# Altium footprint library FootPrintLib_7.PcbLib: 358 footprints (part 3 of 24)
Each footprint in its own frame and in the unit in brackets; x right, y up, seen from the top. Pads: shape width x height; smd on the part's side, far side on the other; paste and mask are expansions set on the pad; w line width, h text height; cw(c..) or ccw(c..) is an arc to the next point about the centre after c.
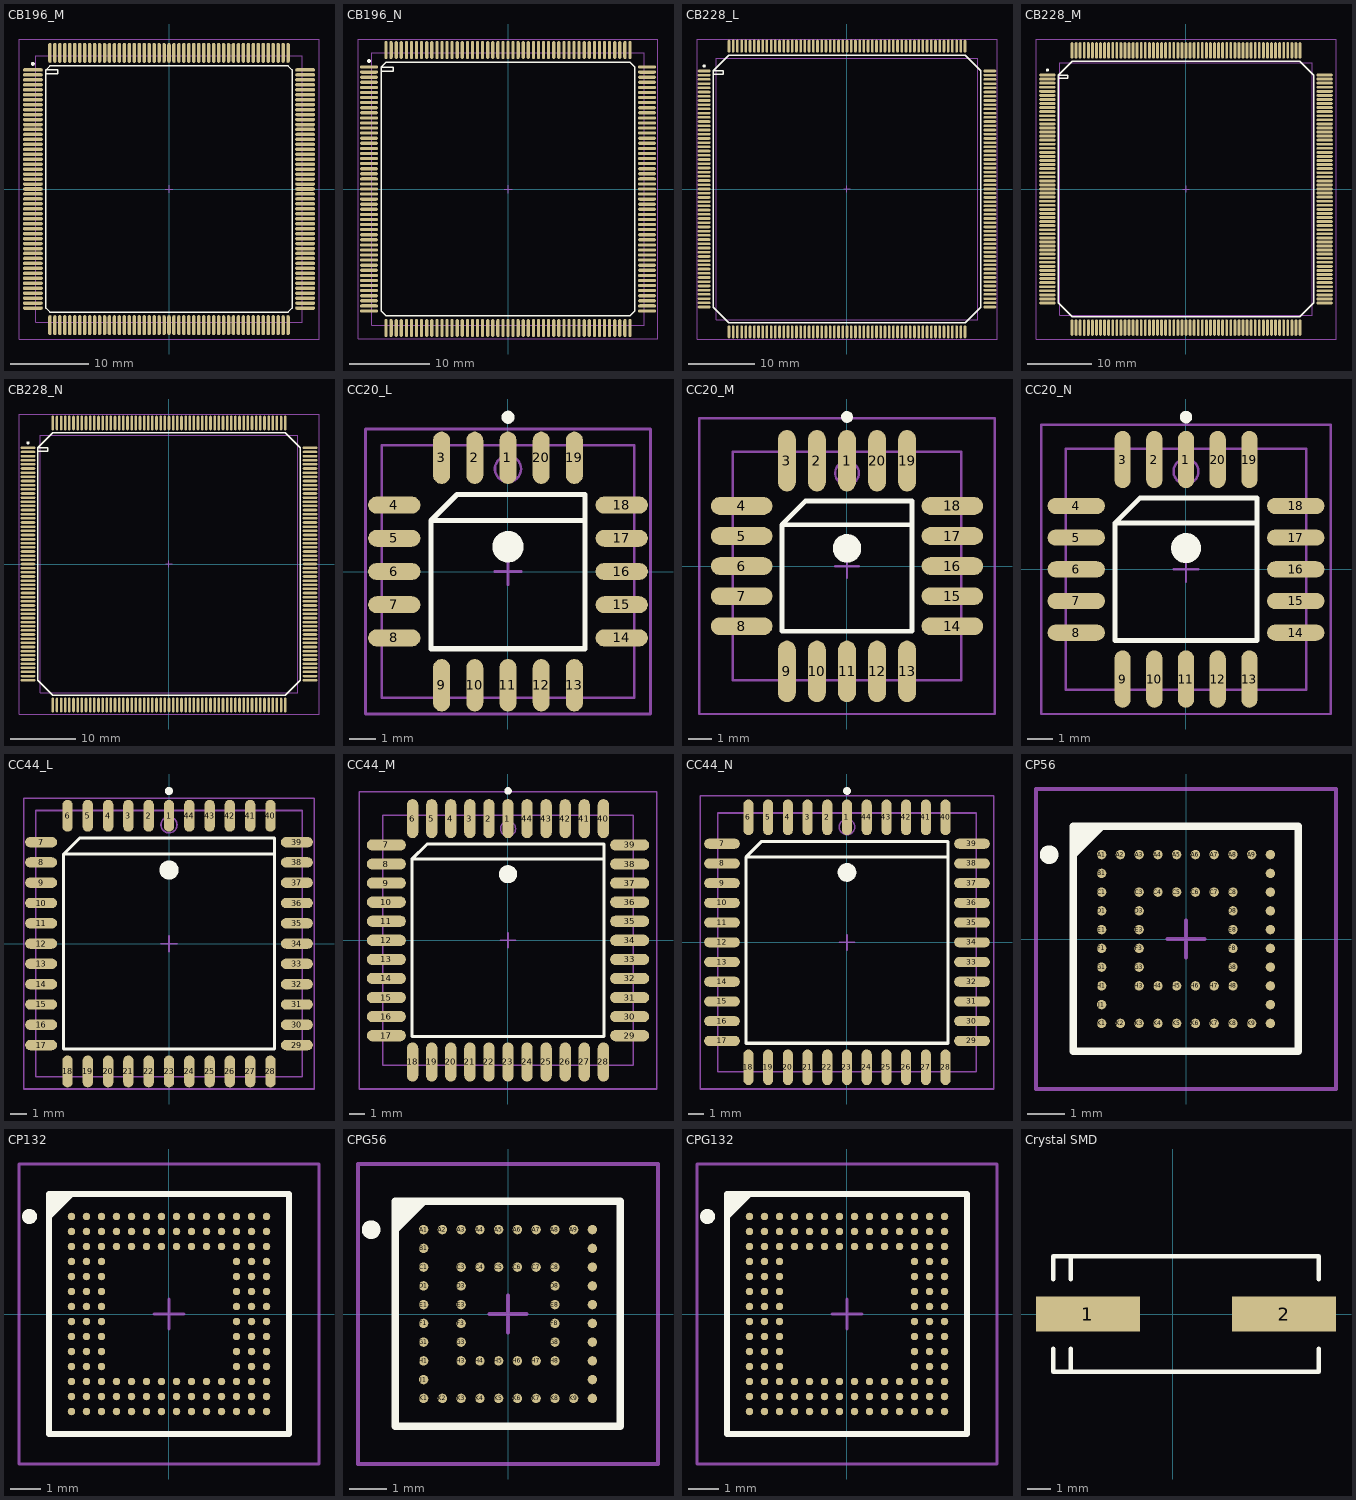
[diagram p2: the footprints below, top view; thin cyan lines are the x and y axes]

## CB196_M [mm] "196-Pin Ceramic Brazed Quad Flat Pack (CB196), IPC Low Density"
height 3.4
pads (196):
  oval 2.55x0.45 smd: 1(-17.425,15.24) 2(-17.425,14.605) 3(-17.425,13.97) 4(-17.425,13.335) 5(-17.425,12.7) 6(-17.425,12.065) 7(-17.425,11.43) 8(-17.425,10.795) 9(-17.425,10.16) 10(-17.425,9.525) 11(-17.425,8.89) 12(-17.425,8.255) 13(-17.425,7.62) 14(-17.425,6.985) 15(-17.425,6.35) 16(-17.425,5.715) 17(-17.425,5.08) 18(-17.425,4.445) 19(-17.425,3.81) 20(-17.425,3.175) 21(-17.425,2.54) 22(-17.425,1.905) 23(-17.425,1.27) 24(-17.425,0.635) 25(-17.425,0) 26(-17.425,-0.635) 27(-17.425,-1.27) 28(-17.425,-1.905) 29(-17.425,-2.54) 30(-17.425,-3.175) 31(-17.425,-3.81) 32(-17.425,-4.445) 33(-17.425,-5.08) 34(-17.425,-5.715) 35(-17.425,-6.35) 36(-17.425,-6.985) 37(-17.425,-7.62) 38(-17.425,-8.255) 39(-17.425,-8.89) 40(-17.425,-9.525) 41(-17.425,-10.16) 42(-17.425,-10.795) 43(-17.425,-11.43) 44(-17.425,-12.065) 45(-17.425,-12.7) 46(-17.425,-13.335) 47(-17.425,-13.97) 48(-17.425,-14.605) 49(-17.425,-15.24) 99(17.425,-15.24) 100(17.425,-14.605) 101(17.425,-13.97) 102(17.425,-13.335) 103(17.425,-12.7) 104(17.425,-12.065) 105(17.425,-11.43) 106(17.425,-10.795) 107(17.425,-10.16) 108(17.425,-9.525) 109(17.425,-8.89) 110(17.425,-8.255) 111(17.425,-7.62) 112(17.425,-6.985) 113(17.425,-6.35) 114(17.425,-5.715) 115(17.425,-5.08) 116(17.425,-4.445) 117(17.425,-3.81) 118(17.425,-3.175) 119(17.425,-2.54) 120(17.425,-1.905) 121(17.425,-1.27) 122(17.425,-0.635) 123(17.425,0) 124(17.425,0.635) 125(17.425,1.27) 126(17.425,1.905) 127(17.425,2.54) 128(17.425,3.175) 129(17.425,3.81) 130(17.425,4.445) 131(17.425,5.08) 132(17.425,5.715) 133(17.425,6.35) 134(17.425,6.985) 135(17.425,7.62) 136(17.425,8.255) 137(17.425,8.89) 138(17.425,9.525) 139(17.425,10.16) 140(17.425,10.795) 141(17.425,11.43) 142(17.425,12.065) 143(17.425,12.7) 144(17.425,13.335) 145(17.425,13.97) 146(17.425,14.605) 147(17.425,15.24)
  oval 0.45x2.55 smd: 50(-15.24,-17.425) 51(-14.605,-17.425) 52(-13.97,-17.425) 53(-13.335,-17.425) 54(-12.7,-17.425) 55(-12.065,-17.425) 56(-11.43,-17.425) 57(-10.795,-17.425) 58(-10.16,-17.425) 59(-9.525,-17.425) 60(-8.89,-17.425) 61(-8.255,-17.425) 62(-7.62,-17.425) 63(-6.985,-17.425) 64(-6.35,-17.425) 65(-5.715,-17.425) 66(-5.08,-17.425) 67(-4.445,-17.425) 68(-3.81,-17.425) 69(-3.175,-17.425) 70(-2.54,-17.425) 71(-1.905,-17.425) 72(-1.27,-17.425) 73(-0.635,-17.425) 74(0,-17.425) 75(0.635,-17.425) 76(1.27,-17.425) 77(1.905,-17.425) 78(2.54,-17.425) 79(3.175,-17.425) 80(3.81,-17.425) 81(4.445,-17.425) 82(5.08,-17.425) 83(5.715,-17.425) 84(6.35,-17.425) 85(6.985,-17.425) 86(7.62,-17.425) 87(8.255,-17.425) 88(8.89,-17.425) 89(9.525,-17.425) 90(10.16,-17.425) 91(10.795,-17.425) 92(11.43,-17.425) 93(12.065,-17.425) 94(12.7,-17.425) 95(13.335,-17.425) 96(13.97,-17.425) 97(14.605,-17.425) 98(15.24,-17.425) 148(15.24,17.425) 149(14.605,17.425) 150(13.97,17.425) 151(13.335,17.425) 152(12.7,17.425) 153(12.065,17.425) 154(11.43,17.425) 155(10.795,17.425) 156(10.16,17.425) 157(9.525,17.425) 158(8.89,17.425) 159(8.255,17.425) 160(7.62,17.425) 161(6.985,17.425) 162(6.35,17.425) 163(5.715,17.425) 164(5.08,17.425) 165(4.445,17.425) 166(3.81,17.425) 167(3.175,17.425) 168(2.54,17.425) 169(1.905,17.425) 170(1.27,17.425) 171(0.635,17.425) 172(0,17.425) 173(-0.635,17.425) 174(-1.27,17.425) 175(-1.905,17.425) 176(-2.54,17.425) 177(-3.175,17.425) 178(-3.81,17.425) 179(-4.445,17.425) 180(-5.08,17.425) 181(-5.715,17.425) 182(-6.35,17.425) 183(-6.985,17.425) 184(-7.62,17.425) 185(-8.255,17.425) 186(-8.89,17.425) 187(-9.525,17.425) 188(-10.16,17.425) 189(-10.795,17.425) 190(-11.43,17.425) 191(-12.065,17.425) 192(-12.7,17.425) 193(-13.335,17.425) 194(-13.97,17.425) 195(-14.605,17.425) 196(-15.24,17.425)
Top Overlay:
  circle w0.25: c-17.425,16.015 r0.125
  lines w0.2: -15.75,14.74 -14.25,14.74 -14.25,15.24 -15.75,15.24 ; -15.75,15.24 -15.24,15.75 15.24,15.75 15.75,15.24 15.75,-15.24 15.24,-15.75 -15.24,-15.75 -15.75,-15.24 -15.75,15.24
Mechanical 13:
  lines w0.1: -17.025,-17.025 17.025,-17.025 17.025,17.025 -17.025,17.025 -17.025,-17.025
Mechanical 15:
  lines w0.1: -0.5,0 0.5,0 ; 0,-0.5 0,0.5 ; -19.2,-19.2 19.2,-19.2 19.2,19.2 -19.2,19.2 -19.2,-19.2
3D body: height 3.4, standoff 0, extent -17.025,-17.025 17.025,17.025

## CB196_N [mm] "196-Pin Ceramic Brazed Quad Flat Pack (CB196), IPC Medium Density"
height 3.4
pads (196):
  oval 2.25x0.4 smd: 1(-17.375,15.24) 2(-17.375,14.605) 3(-17.375,13.97) 4(-17.375,13.335) 5(-17.375,12.7) 6(-17.375,12.065) 7(-17.375,11.43) 8(-17.375,10.795) 9(-17.375,10.16) 10(-17.375,9.525) 11(-17.375,8.89) 12(-17.375,8.255) 13(-17.375,7.62) 14(-17.375,6.985) 15(-17.375,6.35) 16(-17.375,5.715) 17(-17.375,5.08) 18(-17.375,4.445) 19(-17.375,3.81) 20(-17.375,3.175) 21(-17.375,2.54) 22(-17.375,1.905) 23(-17.375,1.27) 24(-17.375,0.635) 25(-17.375,0) 26(-17.375,-0.635) 27(-17.375,-1.27) 28(-17.375,-1.905) 29(-17.375,-2.54) 30(-17.375,-3.175) 31(-17.375,-3.81) 32(-17.375,-4.445) 33(-17.375,-5.08) 34(-17.375,-5.715) 35(-17.375,-6.35) 36(-17.375,-6.985) 37(-17.375,-7.62) 38(-17.375,-8.255) 39(-17.375,-8.89) 40(-17.375,-9.525) 41(-17.375,-10.16) 42(-17.375,-10.795) 43(-17.375,-11.43) 44(-17.375,-12.065) 45(-17.375,-12.7) 46(-17.375,-13.335) 47(-17.375,-13.97) 48(-17.375,-14.605) 49(-17.375,-15.24) 99(17.375,-15.24) 100(17.375,-14.605) 101(17.375,-13.97) 102(17.375,-13.335) 103(17.375,-12.7) 104(17.375,-12.065) 105(17.375,-11.43) 106(17.375,-10.795) 107(17.375,-10.16) 108(17.375,-9.525) 109(17.375,-8.89) 110(17.375,-8.255) 111(17.375,-7.62) 112(17.375,-6.985) 113(17.375,-6.35) 114(17.375,-5.715) 115(17.375,-5.08) 116(17.375,-4.445) 117(17.375,-3.81) 118(17.375,-3.175) 119(17.375,-2.54) 120(17.375,-1.905) 121(17.375,-1.27) 122(17.375,-0.635) 123(17.375,0) 124(17.375,0.635) 125(17.375,1.27) 126(17.375,1.905) 127(17.375,2.54) 128(17.375,3.175) 129(17.375,3.81) 130(17.375,4.445) 131(17.375,5.08) 132(17.375,5.715) 133(17.375,6.35) 134(17.375,6.985) 135(17.375,7.62) 136(17.375,8.255) 137(17.375,8.89) 138(17.375,9.525) 139(17.375,10.16) 140(17.375,10.795) 141(17.375,11.43) 142(17.375,12.065) 143(17.375,12.7) 144(17.375,13.335) 145(17.375,13.97) 146(17.375,14.605) 147(17.375,15.24)
  oval 0.4x2.25 smd: 50(-15.24,-17.375) 51(-14.605,-17.375) 52(-13.97,-17.375) 53(-13.335,-17.375) 54(-12.7,-17.375) 55(-12.065,-17.375) 56(-11.43,-17.375) 57(-10.795,-17.375) 58(-10.16,-17.375) 59(-9.525,-17.375) 60(-8.89,-17.375) 61(-8.255,-17.375) 62(-7.62,-17.375) 63(-6.985,-17.375) 64(-6.35,-17.375) 65(-5.715,-17.375) 66(-5.08,-17.375) 67(-4.445,-17.375) 68(-3.81,-17.375) 69(-3.175,-17.375) 70(-2.54,-17.375) 71(-1.905,-17.375) 72(-1.27,-17.375) 73(-0.635,-17.375) 74(0,-17.375) 75(0.635,-17.375) 76(1.27,-17.375) 77(1.905,-17.375) 78(2.54,-17.375) 79(3.175,-17.375) 80(3.81,-17.375) 81(4.445,-17.375) 82(5.08,-17.375) 83(5.715,-17.375) 84(6.35,-17.375) 85(6.985,-17.375) 86(7.62,-17.375) 87(8.255,-17.375) 88(8.89,-17.375) 89(9.525,-17.375) 90(10.16,-17.375) 91(10.795,-17.375) 92(11.43,-17.375) 93(12.065,-17.375) 94(12.7,-17.375) 95(13.335,-17.375) 96(13.97,-17.375) 97(14.605,-17.375) 98(15.24,-17.375) 148(15.24,17.375) 149(14.605,17.375) 150(13.97,17.375) 151(13.335,17.375) 152(12.7,17.375) 153(12.065,17.375) 154(11.43,17.375) 155(10.795,17.375) 156(10.16,17.375) 157(9.525,17.375) 158(8.89,17.375) 159(8.255,17.375) 160(7.62,17.375) 161(6.985,17.375) 162(6.35,17.375) 163(5.715,17.375) 164(5.08,17.375) 165(4.445,17.375) 166(3.81,17.375) 167(3.175,17.375) 168(2.54,17.375) 169(1.905,17.375) 170(1.27,17.375) 171(0.635,17.375) 172(0,17.375) 173(-0.635,17.375) 174(-1.27,17.375) 175(-1.905,17.375) 176(-2.54,17.375) 177(-3.175,17.375) 178(-3.81,17.375) 179(-4.445,17.375) 180(-5.08,17.375) 181(-5.715,17.375) 182(-6.35,17.375) 183(-6.985,17.375) 184(-7.62,17.375) 185(-8.255,17.375) 186(-8.89,17.375) 187(-9.525,17.375) 188(-10.16,17.375) 189(-10.795,17.375) 190(-11.43,17.375) 191(-12.065,17.375) 192(-12.7,17.375) 193(-13.335,17.375) 194(-13.97,17.375) 195(-14.605,17.375) 196(-15.24,17.375)
Top Overlay:
  circle w0.25: c-17.375,15.99 r0.125
  lines w0.2: -15.85,14.74 -14.35,14.74 -14.35,15.24 -15.85,15.24 ; -15.85,15.24 -15.24,15.85 15.24,15.85 15.85,15.24 15.85,-15.24 15.24,-15.85 -15.24,-15.85 -15.85,-15.24 -15.85,15.24
Mechanical 13:
  lines w0.1: -17.025,-17.025 17.025,-17.025 17.025,17.025 -17.025,17.025 -17.025,-17.025
Mechanical 15:
  lines w0.1: -0.5,0 0.5,0 ; 0,-0.5 0,0.5 ; -18.75,-18.75 18.75,-18.75 18.75,18.75 -18.75,18.75 -18.75,-18.75
3D body: height 3.4, standoff 0, extent -17.025,-17.025 17.025,17.025

## CB228_L [mm] "228-Pin Ceramic Brazed Quad Flat Pack (CB228), IPC High Density"
height 3.4
pads (228):
  oval 1.95x0.4 smd: 1(-21.525,17.78) 2(-21.525,17.145) 3(-21.525,16.51) 4(-21.525,15.875) 5(-21.525,15.24) 6(-21.525,14.605) 7(-21.525,13.97) 8(-21.525,13.335) 9(-21.525,12.7) 10(-21.525,12.065) 11(-21.525,11.43) 12(-21.525,10.795) 13(-21.525,10.16) 14(-21.525,9.525) 15(-21.525,8.89) 16(-21.525,8.255) 17(-21.525,7.62) 18(-21.525,6.985) 19(-21.525,6.35) 20(-21.525,5.715) 21(-21.525,5.08) 22(-21.525,4.445) 23(-21.525,3.81) 24(-21.525,3.175) 25(-21.525,2.54) 26(-21.525,1.905) 27(-21.525,1.27) 28(-21.525,0.635) 29(-21.525,0) 30(-21.525,-0.635) 31(-21.525,-1.27) 32(-21.525,-1.905) 33(-21.525,-2.54) 34(-21.525,-3.175) 35(-21.525,-3.81) 36(-21.525,-4.445) 37(-21.525,-5.08) 38(-21.525,-5.715) 39(-21.525,-6.35) 40(-21.525,-6.985) 41(-21.525,-7.62) 42(-21.525,-8.255) 43(-21.525,-8.89) 44(-21.525,-9.525) 45(-21.525,-10.16) 46(-21.525,-10.795) 47(-21.525,-11.43) 48(-21.525,-12.065) 49(-21.525,-12.7) 50(-21.525,-13.335) 51(-21.525,-13.97) 52(-21.525,-14.605) 53(-21.525,-15.24) 54(-21.525,-15.875) 55(-21.525,-16.51) 56(-21.525,-17.145) 57(-21.525,-17.78) 115(21.525,-17.78) 116(21.525,-17.145) 117(21.525,-16.51) 118(21.525,-15.875) 119(21.525,-15.24) 120(21.525,-14.605) 121(21.525,-13.97) 122(21.525,-13.335) 123(21.525,-12.7) 124(21.525,-12.065) 125(21.525,-11.43) 126(21.525,-10.795) 127(21.525,-10.16) 128(21.525,-9.525) 129(21.525,-8.89) 130(21.525,-8.255) 131(21.525,-7.62) 132(21.525,-6.985) 133(21.525,-6.35) 134(21.525,-5.715) 135(21.525,-5.08) 136(21.525,-4.445) 137(21.525,-3.81) 138(21.525,-3.175) 139(21.525,-2.54) 140(21.525,-1.905) 141(21.525,-1.27) 142(21.525,-0.635) 143(21.525,0) 144(21.525,0.635) 145(21.525,1.27) 146(21.525,1.905) 147(21.525,2.54) 148(21.525,3.175) 149(21.525,3.81) 150(21.525,4.445) 151(21.525,5.08) 152(21.525,5.715) 153(21.525,6.35) 154(21.525,6.985) 155(21.525,7.62) 156(21.525,8.255) 157(21.525,8.89) 158(21.525,9.525) 159(21.525,10.16) 160(21.525,10.795) 161(21.525,11.43) 162(21.525,12.065) 163(21.525,12.7) 164(21.525,13.335) 165(21.525,13.97) 166(21.525,14.605) 167(21.525,15.24) 168(21.525,15.875) 169(21.525,16.51) 170(21.525,17.145) 171(21.525,17.78)
  oval 0.4x1.95 smd: 58(-17.78,-21.525) 59(-17.145,-21.525) 60(-16.51,-21.525) 61(-15.875,-21.525) 62(-15.24,-21.525) 63(-14.605,-21.525) 64(-13.97,-21.525) 65(-13.335,-21.525) 66(-12.7,-21.525) 67(-12.065,-21.525) 68(-11.43,-21.525) 69(-10.795,-21.525) 70(-10.16,-21.525) 71(-9.525,-21.525) 72(-8.89,-21.525) 73(-8.255,-21.525) 74(-7.62,-21.525) 75(-6.985,-21.525) 76(-6.35,-21.525) 77(-5.715,-21.525) 78(-5.08,-21.525) 79(-4.445,-21.525) 80(-3.81,-21.525) 81(-3.175,-21.525) 82(-2.54,-21.525) 83(-1.905,-21.525) 84(-1.27,-21.525) 85(-0.635,-21.525) 86(0,-21.525) 87(0.635,-21.525) 88(1.27,-21.525) 89(1.905,-21.525) 90(2.54,-21.525) 91(3.175,-21.525) 92(3.81,-21.525) 93(4.445,-21.525) 94(5.08,-21.525) 95(5.715,-21.525) 96(6.35,-21.525) 97(6.985,-21.525) 98(7.62,-21.525) 99(8.255,-21.525) 100(8.89,-21.525) 101(9.525,-21.525) 102(10.16,-21.525) 103(10.795,-21.525) 104(11.43,-21.525) 105(12.065,-21.525) 106(12.7,-21.525) 107(13.335,-21.525) 108(13.97,-21.525) 109(14.605,-21.525) 110(15.24,-21.525) 111(15.875,-21.525) 112(16.51,-21.525) 113(17.145,-21.525) 114(17.78,-21.525) 172(17.78,21.525) 173(17.145,21.525) 174(16.51,21.525) 175(15.875,21.525) 176(15.24,21.525) 177(14.605,21.525) 178(13.97,21.525) 179(13.335,21.525) 180(12.7,21.525) 181(12.065,21.525) 182(11.43,21.525) 183(10.795,21.525) 184(10.16,21.525) 185(9.525,21.525) 186(8.89,21.525) 187(8.255,21.525) 188(7.62,21.525) 189(6.985,21.525) 190(6.35,21.525) 191(5.715,21.525) 192(5.08,21.525) 193(4.445,21.525) 194(3.81,21.525) 195(3.175,21.525) 196(2.54,21.525) 197(1.905,21.525) 198(1.27,21.525) 199(0.635,21.525) 200(0,21.525) 201(-0.635,21.525) 202(-1.27,21.525) 203(-1.905,21.525) 204(-2.54,21.525) 205(-3.175,21.525) 206(-3.81,21.525) 207(-4.445,21.525) 208(-5.08,21.525) 209(-5.715,21.525) 210(-6.35,21.525) 211(-6.985,21.525) 212(-7.62,21.525) 213(-8.255,21.525) 214(-8.89,21.525) 215(-9.525,21.525) 216(-10.16,21.525) 217(-10.795,21.525) 218(-11.43,21.525) 219(-12.065,21.525) 220(-12.7,21.525) 221(-13.335,21.525) 222(-13.97,21.525) 223(-14.605,21.525) 224(-15.24,21.525) 225(-15.875,21.525) 226(-16.51,21.525) 227(-17.145,21.525) 228(-17.78,21.525)
Top Overlay:
  circle w0.25: c-21.525,18.53 r0.125
  lines w0.2: -20.15,17.28 -18.65,17.28 -18.65,17.78 -20.15,17.78 ; -20.15,17.78 -20.15,-17.78 -17.78,-20.15 17.78,-20.15 20.15,-17.78 20.15,17.78 17.78,20.15 -17.78,20.15 -20.15,17.78
Mechanical 13:
  lines w0.1: -19.71,-19.71 -19.71,19.71 19.71,19.71 19.71,-19.71 -19.71,-19.71
Mechanical 15:
  lines w0.1: -0.5,0 0.5,0 ; 0,-0.5 0,0.5 ; -22.6,-22.6 -22.6,22.6 22.6,22.6 22.6,-22.6 -22.6,-22.6
3D body: height 3.4, standoff 0, extent -19.71,-19.71 19.71,19.71

## CB228_M [mm] "228-Pin Ceramic Brazed Quad Flat Pack (CB228), IPC Low Density"
height 3.4
pads (228):
  oval 2.55x0.45 smd: 1(-21.625,17.78) 2(-21.625,17.145) 3(-21.625,16.51) 4(-21.625,15.875) 5(-21.625,15.24) 6(-21.625,14.605) 7(-21.625,13.97) 8(-21.625,13.335) 9(-21.625,12.7) 10(-21.625,12.065) 11(-21.625,11.43) 12(-21.625,10.795) 13(-21.625,10.16) 14(-21.625,9.525) 15(-21.625,8.89) 16(-21.625,8.255) 17(-21.625,7.62) 18(-21.625,6.985) 19(-21.625,6.35) 20(-21.625,5.715) 21(-21.625,5.08) 22(-21.625,4.445) 23(-21.625,3.81) 24(-21.625,3.175) 25(-21.625,2.54) 26(-21.625,1.905) 27(-21.625,1.27) 28(-21.625,0.635) 29(-21.625,0) 30(-21.625,-0.635) 31(-21.625,-1.27) 32(-21.625,-1.905) 33(-21.625,-2.54) 34(-21.625,-3.175) 35(-21.625,-3.81) 36(-21.625,-4.445) 37(-21.625,-5.08) 38(-21.625,-5.715) 39(-21.625,-6.35) 40(-21.625,-6.985) 41(-21.625,-7.62) 42(-21.625,-8.255) 43(-21.625,-8.89) 44(-21.625,-9.525) 45(-21.625,-10.16) 46(-21.625,-10.795) 47(-21.625,-11.43) 48(-21.625,-12.065) 49(-21.625,-12.7) 50(-21.625,-13.335) 51(-21.625,-13.97) 52(-21.625,-14.605) 53(-21.625,-15.24) 54(-21.625,-15.875) 55(-21.625,-16.51) 56(-21.625,-17.145) 57(-21.625,-17.78) 115(21.625,-17.78) 116(21.625,-17.145) 117(21.625,-16.51) 118(21.625,-15.875) 119(21.625,-15.24) 120(21.625,-14.605) 121(21.625,-13.97) 122(21.625,-13.335) 123(21.625,-12.7) 124(21.625,-12.065) 125(21.625,-11.43) 126(21.625,-10.795) 127(21.625,-10.16) 128(21.625,-9.525) 129(21.625,-8.89) 130(21.625,-8.255) 131(21.625,-7.62) 132(21.625,-6.985) 133(21.625,-6.35) 134(21.625,-5.715) 135(21.625,-5.08) 136(21.625,-4.445) 137(21.625,-3.81) 138(21.625,-3.175) 139(21.625,-2.54) 140(21.625,-1.905) 141(21.625,-1.27) 142(21.625,-0.635) 143(21.625,0) 144(21.625,0.635) 145(21.625,1.27) 146(21.625,1.905) 147(21.625,2.54) 148(21.625,3.175) 149(21.625,3.81) 150(21.625,4.445) 151(21.625,5.08) 152(21.625,5.715) 153(21.625,6.35) 154(21.625,6.985) 155(21.625,7.62) 156(21.625,8.255) 157(21.625,8.89) 158(21.625,9.525) 159(21.625,10.16) 160(21.625,10.795) 161(21.625,11.43) 162(21.625,12.065) 163(21.625,12.7) 164(21.625,13.335) 165(21.625,13.97) 166(21.625,14.605) 167(21.625,15.24) 168(21.625,15.875) 169(21.625,16.51) 170(21.625,17.145) 171(21.625,17.78)
  oval 0.45x2.55 smd: 58(-17.78,-21.625) 59(-17.145,-21.625) 60(-16.51,-21.625) 61(-15.875,-21.625) 62(-15.24,-21.625) 63(-14.605,-21.625) 64(-13.97,-21.625) 65(-13.335,-21.625) 66(-12.7,-21.625) 67(-12.065,-21.625) 68(-11.43,-21.625) 69(-10.795,-21.625) 70(-10.16,-21.625) 71(-9.525,-21.625) 72(-8.89,-21.625) 73(-8.255,-21.625) 74(-7.62,-21.625) 75(-6.985,-21.625) 76(-6.35,-21.625) 77(-5.715,-21.625) 78(-5.08,-21.625) 79(-4.445,-21.625) 80(-3.81,-21.625) 81(-3.175,-21.625) 82(-2.54,-21.625) 83(-1.905,-21.625) 84(-1.27,-21.625) 85(-0.635,-21.625) 86(0,-21.625) 87(0.635,-21.625) 88(1.27,-21.625) 89(1.905,-21.625) 90(2.54,-21.625) 91(3.175,-21.625) 92(3.81,-21.625) 93(4.445,-21.625) 94(5.08,-21.625) 95(5.715,-21.625) 96(6.35,-21.625) 97(6.985,-21.625) 98(7.62,-21.625) 99(8.255,-21.625) 100(8.89,-21.625) 101(9.525,-21.625) 102(10.16,-21.625) 103(10.795,-21.625) 104(11.43,-21.625) 105(12.065,-21.625) 106(12.7,-21.625) 107(13.335,-21.625) 108(13.97,-21.625) 109(14.605,-21.625) 110(15.24,-21.625) 111(15.875,-21.625) 112(16.51,-21.625) 113(17.145,-21.625) 114(17.78,-21.625) 172(17.78,21.625) 173(17.145,21.625) 174(16.51,21.625) 175(15.875,21.625) 176(15.24,21.625) 177(14.605,21.625) 178(13.97,21.625) 179(13.335,21.625) 180(12.7,21.625) 181(12.065,21.625) 182(11.43,21.625) 183(10.795,21.625) 184(10.16,21.625) 185(9.525,21.625) 186(8.89,21.625) 187(8.255,21.625) 188(7.62,21.625) 189(6.985,21.625) 190(6.35,21.625) 191(5.715,21.625) 192(5.08,21.625) 193(4.445,21.625) 194(3.81,21.625) 195(3.175,21.625) 196(2.54,21.625) 197(1.905,21.625) 198(1.27,21.625) 199(0.635,21.625) 200(0,21.625) 201(-0.635,21.625) 202(-1.27,21.625) 203(-1.905,21.625) 204(-2.54,21.625) 205(-3.175,21.625) 206(-3.81,21.625) 207(-4.445,21.625) 208(-5.08,21.625) 209(-5.715,21.625) 210(-6.35,21.625) 211(-6.985,21.625) 212(-7.62,21.625) 213(-8.255,21.625) 214(-8.89,21.625) 215(-9.525,21.625) 216(-10.16,21.625) 217(-10.795,21.625) 218(-11.43,21.625) 219(-12.065,21.625) 220(-12.7,21.625) 221(-13.335,21.625) 222(-13.97,21.625) 223(-14.605,21.625) 224(-15.24,21.625) 225(-15.875,21.625) 226(-16.51,21.625) 227(-17.145,21.625) 228(-17.78,21.625)
Top Overlay:
  circle w0.25: c-21.625,18.555 r0.125
  lines w0.2: -19.95,17.28 -18.45,17.28 -18.45,17.78 -19.95,17.78 ; -19.95,17.78 -19.95,-17.78 -17.78,-19.95 17.78,-19.95 19.95,-17.78 19.95,17.78 17.78,19.95 -17.78,19.95 -19.95,17.78
Mechanical 13:
  lines w0.1: -19.71,-19.71 -19.71,19.71 19.71,19.71 19.71,-19.71 -19.71,-19.71
Mechanical 15:
  lines w0.1: -0.5,0 0.5,0 ; 0,-0.5 0,0.5 ; -23.4,-23.4 -23.4,23.4 23.4,23.4 23.4,-23.4 -23.4,-23.4
3D body: height 3.4, standoff 0, extent -19.71,-19.71 19.71,19.71

## CB228_N [mm] "228-Pin Ceramic Brazed Quad Flat Pack (CB228), IPC Medium Density"
height 3.4
pads (228):
  oval 2.25x0.4 smd: 1(-21.575,17.78) 2(-21.575,17.145) 3(-21.575,16.51) 4(-21.575,15.875) 5(-21.575,15.24) 6(-21.575,14.605) 7(-21.575,13.97) 8(-21.575,13.335) 9(-21.575,12.7) 10(-21.575,12.065) 11(-21.575,11.43) 12(-21.575,10.795) 13(-21.575,10.16) 14(-21.575,9.525) 15(-21.575,8.89) 16(-21.575,8.255) 17(-21.575,7.62) 18(-21.575,6.985) 19(-21.575,6.35) 20(-21.575,5.715) 21(-21.575,5.08) 22(-21.575,4.445) 23(-21.575,3.81) 24(-21.575,3.175) 25(-21.575,2.54) 26(-21.575,1.905) 27(-21.575,1.27) 28(-21.575,0.635) 29(-21.575,0) 30(-21.575,-0.635) 31(-21.575,-1.27) 32(-21.575,-1.905) 33(-21.575,-2.54) 34(-21.575,-3.175) 35(-21.575,-3.81) 36(-21.575,-4.445) 37(-21.575,-5.08) 38(-21.575,-5.715) 39(-21.575,-6.35) 40(-21.575,-6.985) 41(-21.575,-7.62) 42(-21.575,-8.255) 43(-21.575,-8.89) 44(-21.575,-9.525) 45(-21.575,-10.16) 46(-21.575,-10.795) 47(-21.575,-11.43) 48(-21.575,-12.065) 49(-21.575,-12.7) 50(-21.575,-13.335) 51(-21.575,-13.97) 52(-21.575,-14.605) 53(-21.575,-15.24) 54(-21.575,-15.875) 55(-21.575,-16.51) 56(-21.575,-17.145) 57(-21.575,-17.78) 115(21.575,-17.78) 116(21.575,-17.145) 117(21.575,-16.51) 118(21.575,-15.875) 119(21.575,-15.24) 120(21.575,-14.605) 121(21.575,-13.97) 122(21.575,-13.335) 123(21.575,-12.7) 124(21.575,-12.065) 125(21.575,-11.43) 126(21.575,-10.795) 127(21.575,-10.16) 128(21.575,-9.525) 129(21.575,-8.89) 130(21.575,-8.255) 131(21.575,-7.62) 132(21.575,-6.985) 133(21.575,-6.35) 134(21.575,-5.715) 135(21.575,-5.08) 136(21.575,-4.445) 137(21.575,-3.81) 138(21.575,-3.175) 139(21.575,-2.54) 140(21.575,-1.905) 141(21.575,-1.27) 142(21.575,-0.635) 143(21.575,0) 144(21.575,0.635) 145(21.575,1.27) 146(21.575,1.905) 147(21.575,2.54) 148(21.575,3.175) 149(21.575,3.81) 150(21.575,4.445) 151(21.575,5.08) 152(21.575,5.715) 153(21.575,6.35) 154(21.575,6.985) 155(21.575,7.62) 156(21.575,8.255) 157(21.575,8.89) 158(21.575,9.525) 159(21.575,10.16) 160(21.575,10.795) 161(21.575,11.43) 162(21.575,12.065) 163(21.575,12.7) 164(21.575,13.335) 165(21.575,13.97) 166(21.575,14.605) 167(21.575,15.24) 168(21.575,15.875) 169(21.575,16.51) 170(21.575,17.145) 171(21.575,17.78)
  oval 0.4x2.25 smd: 58(-17.78,-21.575) 59(-17.145,-21.575) 60(-16.51,-21.575) 61(-15.875,-21.575) 62(-15.24,-21.575) 63(-14.605,-21.575) 64(-13.97,-21.575) 65(-13.335,-21.575) 66(-12.7,-21.575) 67(-12.065,-21.575) 68(-11.43,-21.575) 69(-10.795,-21.575) 70(-10.16,-21.575) 71(-9.525,-21.575) 72(-8.89,-21.575) 73(-8.255,-21.575) 74(-7.62,-21.575) 75(-6.985,-21.575) 76(-6.35,-21.575) 77(-5.715,-21.575) 78(-5.08,-21.575) 79(-4.445,-21.575) 80(-3.81,-21.575) 81(-3.175,-21.575) 82(-2.54,-21.575) 83(-1.905,-21.575) 84(-1.27,-21.575) 85(-0.635,-21.575) 86(0,-21.575) 87(0.635,-21.575) 88(1.27,-21.575) 89(1.905,-21.575) 90(2.54,-21.575) 91(3.175,-21.575) 92(3.81,-21.575) 93(4.445,-21.575) 94(5.08,-21.575) 95(5.715,-21.575) 96(6.35,-21.575) 97(6.985,-21.575) 98(7.62,-21.575) 99(8.255,-21.575) 100(8.89,-21.575) 101(9.525,-21.575) 102(10.16,-21.575) 103(10.795,-21.575) 104(11.43,-21.575) 105(12.065,-21.575) 106(12.7,-21.575) 107(13.335,-21.575) 108(13.97,-21.575) 109(14.605,-21.575) 110(15.24,-21.575) 111(15.875,-21.575) 112(16.51,-21.575) 113(17.145,-21.575) 114(17.78,-21.575) 172(17.78,21.575) 173(17.145,21.575) 174(16.51,21.575) 175(15.875,21.575) 176(15.24,21.575) 177(14.605,21.575) 178(13.97,21.575) 179(13.335,21.575) 180(12.7,21.575) 181(12.065,21.575) 182(11.43,21.575) 183(10.795,21.575) 184(10.16,21.575) 185(9.525,21.575) 186(8.89,21.575) 187(8.255,21.575) 188(7.62,21.575) 189(6.985,21.575) 190(6.35,21.575) 191(5.715,21.575) 192(5.08,21.575) 193(4.445,21.575) 194(3.81,21.575) 195(3.175,21.575) 196(2.54,21.575) 197(1.905,21.575) 198(1.27,21.575) 199(0.635,21.575) 200(0,21.575) 201(-0.635,21.575) 202(-1.27,21.575) 203(-1.905,21.575) 204(-2.54,21.575) 205(-3.175,21.575) 206(-3.81,21.575) 207(-4.445,21.575) 208(-5.08,21.575) 209(-5.715,21.575) 210(-6.35,21.575) 211(-6.985,21.575) 212(-7.62,21.575) 213(-8.255,21.575) 214(-8.89,21.575) 215(-9.525,21.575) 216(-10.16,21.575) 217(-10.795,21.575) 218(-11.43,21.575) 219(-12.065,21.575) 220(-12.7,21.575) 221(-13.335,21.575) 222(-13.97,21.575) 223(-14.605,21.575) 224(-15.24,21.575) 225(-15.875,21.575) 226(-16.51,21.575) 227(-17.145,21.575) 228(-17.78,21.575)
Top Overlay:
  circle w0.25: c-21.575,18.53 r0.125
  lines w0.2: -20.05,17.28 -18.55,17.28 -18.55,17.78 -20.05,17.78 ; -20.05,17.78 -20.05,-17.78 -17.78,-20.05 17.78,-20.05 20.05,-17.78 20.05,17.78 17.78,20.05 -17.78,20.05 -20.05,17.78
Mechanical 13:
  lines w0.1: -19.71,-19.71 -19.71,19.71 19.71,19.71 19.71,-19.71 -19.71,-19.71
Mechanical 15:
  lines w0.1: -0.5,0 0.5,0 ; 0,-0.5 0,0.5 ; -22.95,-22.95 -22.95,22.95 22.95,22.95 22.95,-22.95 -22.95,-22.95
3D body: height 3.4, standoff 0, extent -19.71,-19.71 19.71,19.71

## CC20_L [mm] "20-Pin Ceramic Leaded Chip Carrier (CC20), IPC High Density"
height 3.94
pads (20):
  oval 0.65x2 smd: 1(0,4.35) 2(-1.27,4.35) 3(-2.54,4.35) 9(-2.54,-4.35) 10(-1.27,-4.35) 11(0,-4.35) 12(1.27,-4.35) 13(2.54,-4.35) 19(2.54,4.35) 20(1.27,4.35)
  oval 2x0.65 smd: 4(-4.35,2.54) 5(-4.35,1.27) 6(-4.35,0) 7(-4.35,-1.27) 8(-4.35,-2.54) 14(4.35,-2.54) 15(4.35,-1.27) 16(4.35,0) 17(4.35,1.27) 18(4.35,2.54)
Top Overlay:
  circle w0.25: c0,5.9 r0.125
  circle w0.6: c0,0.95 r0.3
  lines w0.2: 2.95,1.95 -2.95,1.95 ; -2.95,1.95 -1.95,2.95 2.95,2.95 2.95,-2.95 -2.95,-2.95 -2.95,1.95
Mechanical 13:
  circle w0.1: c0,3.925 r0.5
  lines w0.1: -4.825,-4.825 -4.825,4.825 4.825,4.825 4.825,-4.825 -4.825,-4.825
Mechanical 15:
  lines w0.1: -0.5,0 0.5,0 ; 0,-0.5 0,0.5 ; -5.45,-5.45 -5.45,5.45 5.45,5.45 5.45,-5.45 -5.45,-5.45
3D body: height 3.94, standoff 0, extent -4.825,-4.825 4.825,4.825

## CC20_M [mm] "20-Pin Ceramic Leaded Chip Carrier (CC20), IPC Low Density"
height 3.94
pads (20):
  oval 0.75x2.6 smd: 1(0,4.45) 2(-1.27,4.45) 3(-2.54,4.45) 9(-2.54,-4.45) 10(-1.27,-4.45) 11(0,-4.45) 12(1.27,-4.45) 13(2.54,-4.45) 19(2.54,4.45) 20(1.27,4.45)
  oval 2.6x0.75 smd: 4(-4.45,2.54) 5(-4.45,1.27) 6(-4.45,0) 7(-4.45,-1.27) 8(-4.45,-2.54) 14(4.45,-2.54) 15(4.45,-1.27) 16(4.45,0) 17(4.45,1.27) 18(4.45,2.54)
Top Overlay:
  circle w0.25: c0,6.3 r0.125
  circle w0.6: c0,0.75 r0.3
  lines w0.2: 2.75,1.75 -2.75,1.75 ; -2.75,1.75 -1.75,2.75 2.75,2.75 2.75,-2.75 -2.75,-2.75 -2.75,1.75
Mechanical 13:
  circle w0.1: c0,3.925 r0.5
  lines w0.1: -4.825,-4.825 -4.825,4.825 4.825,4.825 4.825,-4.825 -4.825,-4.825
Mechanical 15:
  lines w0.1: -0.5,0 0.5,0 ; 0,-0.5 0,0.5 ; -6.25,-6.25 -6.25,6.25 6.25,6.25 6.25,-6.25 -6.25,-6.25
3D body: height 3.94, standoff 0, extent -4.825,-4.825 4.825,4.825

## CC20_N [mm] "20-Pin Ceramic Leaded Chip Carrier (CC20), IPC Medium Density"
height 3.94
pads (20):
  oval 0.65x2.3 smd: 1(0,4.4) 2(-1.27,4.4) 3(-2.54,4.4) 9(-2.54,-4.4) 10(-1.27,-4.4) 11(0,-4.4) 12(1.27,-4.4) 13(2.54,-4.4) 19(2.54,4.4) 20(1.27,4.4)
  oval 2.3x0.65 smd: 4(-4.4,2.54) 5(-4.4,1.27) 6(-4.4,0) 7(-4.4,-1.27) 8(-4.4,-2.54) 14(4.4,-2.54) 15(4.4,-1.27) 16(4.4,0) 17(4.4,1.27) 18(4.4,2.54)
Top Overlay:
  circle w0.25: c0,6.1 r0.125
  circle w0.6: c0,0.85 r0.3
  lines w0.2: 2.85,1.85 -2.85,1.85 ; -2.85,1.85 -1.85,2.85 2.85,2.85 2.85,-2.85 -2.85,-2.85 -2.85,1.85
Mechanical 13:
  circle w0.1: c0,3.925 r0.5
  lines w0.1: -4.825,-4.825 -4.825,4.825 4.825,4.825 4.825,-4.825 -4.825,-4.825
Mechanical 15:
  lines w0.1: -0.5,0 0.5,0 ; 0,-0.5 0,0.5 ; -5.8,-5.8 -5.8,5.8 5.8,5.8 5.8,-5.8 -5.8,-5.8
3D body: height 3.94, standoff 0, extent -4.825,-4.825 4.825,4.825

## CC44_L [mm] "44-Pin Ceramic Chip Carrier Package (CC44), IPC High Density"
height 4.83
pads (44):
  oval 0.65x2 smd: 1(0,8) 2(-1.27,8) 3(-2.54,8) 4(-3.81,8) 5(-5.08,8) 6(-6.35,8) 18(-6.35,-8) 19(-5.08,-8) 20(-3.81,-8) 21(-2.54,-8) 22(-1.27,-8) 23(0,-8) 24(1.27,-8) 25(2.54,-8) 26(3.81,-8) 27(5.08,-8) 28(6.35,-8) 40(6.35,8) 41(5.08,8) 42(3.81,8) 43(2.54,8) 44(1.27,8)
  oval 2x0.65 smd: 7(-8,6.35) 8(-8,5.08) 9(-8,3.81) 10(-8,2.54) 11(-8,1.27) 12(-8,0) 13(-8,-1.27) 14(-8,-2.54) 15(-8,-3.81) 16(-8,-5.08) 17(-8,-6.35) 29(8,-6.35) 30(8,-5.08) 31(8,-3.81) 32(8,-2.54) 33(8,-1.27) 34(8,0) 35(8,1.27) 36(8,2.54) 37(8,3.81) 38(8,5.08) 39(8,6.35)
Top Overlay:
  circle w0.6: c0,4.6 r0.3
  circle w0.25: c0,9.55 r0.125
  lines w0.2: 6.6,5.6 -6.6,5.6 ; -6.6,5.6 -6.6,-6.6 6.6,-6.6 6.6,6.6 -5.6,6.6 -6.6,5.6
Mechanical 13:
  circle w0.1: c0,7.43 r0.5
  lines w0.1: -8.33,-8.33 8.33,-8.33 8.33,8.33 -8.33,8.33 -8.33,-8.33
Mechanical 15:
  lines w0.1: -0.5,0 0.5,0 ; 0,-0.5 0,0.5 ; -9.1,-9.1 9.1,-9.1 9.1,9.1 -9.1,9.1 -9.1,-9.1
3D body: height 4.83, standoff 0, extent -8.33,-8.33 8.33,8.33

## CC44_M [mm] "44-Pin Ceramic Chip Carrier Package (CC44), IPC Low Density"
height 4.83
pads (44):
  oval 0.75x2.6 smd: 1(0,8.1) 2(-1.27,8.1) 3(-2.54,8.1) 4(-3.81,8.1) 5(-5.08,8.1) 6(-6.35,8.1) 18(-6.35,-8.1) 19(-5.08,-8.1) 20(-3.81,-8.1) 21(-2.54,-8.1) 22(-1.27,-8.1) 23(0,-8.1) 24(1.27,-8.1) 25(2.54,-8.1) 26(3.81,-8.1) 27(5.08,-8.1) 28(6.35,-8.1) 40(6.35,8.1) 41(5.08,8.1) 42(3.81,8.1) 43(2.54,8.1) 44(1.27,8.1)
  oval 2.6x0.75 smd: 7(-8.1,6.35) 8(-8.1,5.08) 9(-8.1,3.81) 10(-8.1,2.54) 11(-8.1,1.27) 12(-8.1,0) 13(-8.1,-1.27) 14(-8.1,-2.54) 15(-8.1,-3.81) 16(-8.1,-5.08) 17(-8.1,-6.35) 29(8.1,-6.35) 30(8.1,-5.08) 31(8.1,-3.81) 32(8.1,-2.54) 33(8.1,-1.27) 34(8.1,0) 35(8.1,1.27) 36(8.1,2.54) 37(8.1,3.81) 38(8.1,5.08) 39(8.1,6.35)
Top Overlay:
  circle w0.25: c0,9.95 r0.125
  circle w0.6: c0,4.4 r0.3
  lines w0.2: 6.4,5.4 -6.4,5.4 ; -6.4,5.4 -5.4,6.4 6.4,6.4 6.4,-6.4 -6.4,-6.4 -6.4,5.4
Mechanical 13:
  circle w0.1: c0,7.43 r0.5
  lines w0.1: -8.33,-8.33 -8.33,8.33 8.33,8.33 8.33,-8.33 -8.33,-8.33
Mechanical 15:
  lines w0.1: -0.5,0 0.5,0 ; 0,-0.5 0,0.5 ; -9.9,-9.9 -9.9,9.9 9.9,9.9 9.9,-9.9 -9.9,-9.9
3D body: height 4.83, standoff 0, extent -8.33,-8.33 8.33,8.33

## CC44_N [mm] "44-Pin Ceramic Chip Carrier Package (CC44), IPC Medium Density"
height 4.83
pads (44):
  oval 0.65x2.3 smd: 1(0,8.05) 2(-1.27,8.05) 3(-2.54,8.05) 4(-3.81,8.05) 5(-5.08,8.05) 6(-6.35,8.05) 18(-6.35,-8.05) 19(-5.08,-8.05) 20(-3.81,-8.05) 21(-2.54,-8.05) 22(-1.27,-8.05) 23(0,-8.05) 24(1.27,-8.05) 25(2.54,-8.05) 26(3.81,-8.05) 27(5.08,-8.05) 28(6.35,-8.05) 40(6.35,8.05) 41(5.08,8.05) 42(3.81,8.05) 43(2.54,8.05) 44(1.27,8.05)
  oval 2.3x0.65 smd: 7(-8.05,6.35) 8(-8.05,5.08) 9(-8.05,3.81) 10(-8.05,2.54) 11(-8.05,1.27) 12(-8.05,0) 13(-8.05,-1.27) 14(-8.05,-2.54) 15(-8.05,-3.81) 16(-8.05,-5.08) 17(-8.05,-6.35) 29(8.05,-6.35) 30(8.05,-5.08) 31(8.05,-3.81) 32(8.05,-2.54) 33(8.05,-1.27) 34(8.05,0) 35(8.05,1.27) 36(8.05,2.54) 37(8.05,3.81) 38(8.05,5.08) 39(8.05,6.35)
Top Overlay:
  circle w0.25: c0,9.75 r0.125
  circle w0.6: c0,4.5 r0.3
  lines w0.2: 6.5,5.5 -6.5,5.5 ; -6.5,5.5 -5.5,6.5 6.5,6.5 6.5,-6.5 -6.5,-6.5 -6.5,5.5
Mechanical 13:
  circle w0.1: c0,7.43 r0.5
  lines w0.1: -8.33,-8.33 -8.33,8.33 8.33,8.33 8.33,-8.33 -8.33,-8.33
Mechanical 15:
  lines w0.1: -0.5,0 0.5,0 ; 0,-0.5 0,0.5 ; -9.45,-9.45 -9.45,9.45 9.45,9.45 9.45,-9.45 -9.45,-9.45
3D body: height 4.83, standoff 0, extent -8.33,-8.33 8.33,8.33

## CP56 [mm] "56-Ball Chip Scale Ball Grid Array 0.5 mm Pitch (CP56)"
height 1.35
pads (56):
  round 0.25 smd: A1(-2.25,2.25) A2(-1.75,2.25) A3(-1.25,2.25) A4(-0.75,2.25) A5(-0.25,2.25) A6(0.25,2.25) A7(0.75,2.25) A8(1.25,2.25) A9(1.75,2.25) A10(2.25,2.25) B1(-2.25,1.75) B10(2.25,1.75) C1(-2.25,1.25) C3(-1.25,1.25) C4(-0.75,1.25) C5(-0.25,1.25) C6(0.25,1.25) C7(0.75,1.25) C8(1.25,1.25) C10(2.25,1.25) D1(-2.25,0.75) D3(-1.25,0.75) D8(1.25,0.75) D10(2.25,0.75) E1(-2.25,0.25) E3(-1.25,0.25) E8(1.25,0.25) E10(2.25,0.25) F1(-2.25,-0.25) F3(-1.25,-0.25) F8(1.25,-0.25) F10(2.25,-0.25) G1(-2.25,-0.75) G3(-1.25,-0.75) G8(1.25,-0.75) G10(2.25,-0.75) H1(-2.25,-1.25) H3(-1.25,-1.25) H4(-0.75,-1.25) H5(-0.25,-1.25) H6(0.25,-1.25) H7(0.75,-1.25) H8(1.25,-1.25) H10(2.25,-1.25) J1(-2.25,-1.75) J10(2.25,-1.75) K1(-2.25,-2.25) K2(-1.75,-2.25) K3(-1.25,-2.25) K4(-0.75,-2.25) K5(-0.25,-2.25) K6(0.25,-2.25) K7(0.75,-2.25) K8(1.25,-2.25) K9(1.75,-2.25) K10(2.25,-2.25)
Top Overlay:
  circle w0.25: c-3.65,2.25 r0.125
  region: -2.242,3 -3,2.242 -3,3
  lines w0.2: -3,2.242 -2.242,3 ; -3,-3 -3,3 3,3 3,-3 -3,-3
Mechanical 13:
  lines w0.1: -3,-3 -3,3 3,3 3,-3 -3,-3
Mechanical 15:
  lines w0.1: -0.5,0 0.5,0 ; 0,-0.5 0,0.5 ; -4,-4 -4,4 4,4 4,-4 -4,-4
3D body: height 1.35, standoff 0, extent -3,-3 3,3

## CP132 [mm] "132-Ball Chip Scale Ball Grid Array 0.5 mm Pitch (CP132)"
height 1.1
pads (132):
  round 0.25 smd: A1(-3.25,3.25) A2(-2.75,3.25) A3(-2.25,3.25) A4(-1.75,3.25) A5(-1.25,3.25) A6(-0.75,3.25) A7(-0.25,3.25) A8(0.25,3.25) A9(0.75,3.25) A10(1.25,3.25) A11(1.75,3.25) A12(2.25,3.25) A13(2.75,3.25) A14(3.25,3.25) B1(-3.25,2.75) B2(-2.75,2.75) B3(-2.25,2.75) B4(-1.75,2.75) B5(-1.25,2.75) B6(-0.75,2.75) B7(-0.25,2.75) B8(0.25,2.75) B9(0.75,2.75) B10(1.25,2.75) B11(1.75,2.75) B12(2.25,2.75) B13(2.75,2.75) B14(3.25,2.75) C1(-3.25,2.25) C2(-2.75,2.25) C3(-2.25,2.25) C4(-1.75,2.25) C5(-1.25,2.25) C6(-0.75,2.25) C7(-0.25,2.25) C8(0.25,2.25) C9(0.75,2.25) C10(1.25,2.25) C11(1.75,2.25) C12(2.25,2.25) C13(2.75,2.25) C14(3.25,2.25) D1(-3.25,1.75) D2(-2.75,1.75) D3(-2.25,1.75) D12(2.25,1.75) D13(2.75,1.75) D14(3.25,1.75) E1(-3.25,1.25) E2(-2.75,1.25) E3(-2.25,1.25) E12(2.25,1.25) E13(2.75,1.25) E14(3.25,1.25) F1(-3.25,0.75) F2(-2.75,0.75) F3(-2.25,0.75) F12(2.25,0.75) F13(2.75,0.75) F14(3.25,0.75) G1(-3.25,0.25) G2(-2.75,0.25) G3(-2.25,0.25) G12(2.25,0.25) G13(2.75,0.25) G14(3.25,0.25) H1(-3.25,-0.25) H2(-2.75,-0.25) H3(-2.25,-0.25) H12(2.25,-0.25) H13(2.75,-0.25) H14(3.25,-0.25) J1(-3.25,-0.75) J2(-2.75,-0.75) J3(-2.25,-0.75) J12(2.25,-0.75) J13(2.75,-0.75) J14(3.25,-0.75) K1(-3.25,-1.25) K2(-2.75,-1.25) K3(-2.25,-1.25) K12(2.25,-1.25) K13(2.75,-1.25) K14(3.25,-1.25) L1(-3.25,-1.75) L2(-2.75,-1.75) L3(-2.25,-1.75) L12(2.25,-1.75) L13(2.75,-1.75) L14(3.25,-1.75) M1(-3.25,-2.25) M2(-2.75,-2.25) M3(-2.25,-2.25) M4(-1.75,-2.25) M5(-1.25,-2.25) M6(-0.75,-2.25) M7(-0.25,-2.25) M8(0.25,-2.25) M9(0.75,-2.25) M10(1.25,-2.25) M11(1.75,-2.25) M12(2.25,-2.25) M13(2.75,-2.25) M14(3.25,-2.25) N1(-3.25,-2.75) N2(-2.75,-2.75) N3(-2.25,-2.75) N4(-1.75,-2.75) N5(-1.25,-2.75) N6(-0.75,-2.75) N7(-0.25,-2.75) N8(0.25,-2.75) N9(0.75,-2.75) N10(1.25,-2.75) N11(1.75,-2.75) N12(2.25,-2.75) N13(2.75,-2.75) N14(3.25,-2.75) P1(-3.25,-3.25) P2(-2.75,-3.25) P3(-2.25,-3.25) P4(-1.75,-3.25) P5(-1.25,-3.25) P6(-0.75,-3.25) P7(-0.25,-3.25) P8(0.25,-3.25) P9(0.75,-3.25) P10(1.25,-3.25) P11(1.75,-3.25) P12(2.25,-3.25) P13(2.75,-3.25) P14(3.25,-3.25)
Top Overlay:
  circle w0.25: c-4.65,3.25 r0.125
  region: -3.242,4 -4,3.242 -4,4
  lines w0.2: -4,3.242 -3.242,4 ; -4,-4 4,-4 4,4 -4,4 -4,-4
Mechanical 13:
  lines w0.1: -4,-4 4,-4 4,4 -4,4 -4,-4
Mechanical 15:
  lines w0.1: -0.5,0 0.5,0 ; 0,-0.5 0,0.5 ; -5,-5 5,-5 5,5 -5,5 -5,-5
3D body: height 1.1, standoff 0, extent -4,-4 4,4

## CPG56 [mm] "56-Ball Chip Scale Ball Grid Array 0.5 mm Pitch (CPG56) - Pb-Free"
height 1.35
pads (56):
  round 0.25 smd: A1(-2.25,2.25) A2(-1.75,2.25) A3(-1.25,2.25) A4(-0.75,2.25) A5(-0.25,2.25) A6(0.25,2.25) A7(0.75,2.25) A8(1.25,2.25) A9(1.75,2.25) A10(2.25,2.25) B1(-2.25,1.75) B10(2.25,1.75) C1(-2.25,1.25) C3(-1.25,1.25) C4(-0.75,1.25) C5(-0.25,1.25) C6(0.25,1.25) C7(0.75,1.25) C8(1.25,1.25) C10(2.25,1.25) D1(-2.25,0.75) D3(-1.25,0.75) D8(1.25,0.75) D10(2.25,0.75) E1(-2.25,0.25) E3(-1.25,0.25) E8(1.25,0.25) E10(2.25,0.25) F1(-2.25,-0.25) F3(-1.25,-0.25) F8(1.25,-0.25) F10(2.25,-0.25) G1(-2.25,-0.75) G3(-1.25,-0.75) G8(1.25,-0.75) G10(2.25,-0.75) H1(-2.25,-1.25) H3(-1.25,-1.25) H4(-0.75,-1.25) H5(-0.25,-1.25) H6(0.25,-1.25) H7(0.75,-1.25) H8(1.25,-1.25) H10(2.25,-1.25) J1(-2.25,-1.75) J10(2.25,-1.75) K1(-2.25,-2.25) K2(-1.75,-2.25) K3(-1.25,-2.25) K4(-0.75,-2.25) K5(-0.25,-2.25) K6(0.25,-2.25) K7(0.75,-2.25) K8(1.25,-2.25) K9(1.75,-2.25) K10(2.25,-2.25)
Top Overlay:
  circle w0.25: c-3.65,2.25 r0.125
  region: -2.242,3 -3,2.242 -3,3
  lines w0.2: -3,2.242 -2.242,3 ; -3,-3 3,-3 3,3 -3,3 -3,-3
Mechanical 13:
  lines w0.1: -3,-3 3,-3 3,3 -3,3 -3,-3
Mechanical 15:
  lines w0.1: -0.5,0 0.5,0 ; 0,-0.5 0,0.5 ; -4,-4 4,-4 4,4 -4,4 -4,-4
3D body: height 1.35, standoff 0, extent -3,-3 3,3

## CPG132 [mm] "132-Ball Chip Scale Ball Grid Array 0.5 mm Pitch (CPG132) - Pb-Free"
height 1.1
pads (132):
  round 0.25 smd: A1(-3.25,3.25) A2(-2.75,3.25) A3(-2.25,3.25) A4(-1.75,3.25) A5(-1.25,3.25) A6(-0.75,3.25) A7(-0.25,3.25) A8(0.25,3.25) A9(0.75,3.25) A10(1.25,3.25) A11(1.75,3.25) A12(2.25,3.25) A13(2.75,3.25) A14(3.25,3.25) B1(-3.25,2.75) B2(-2.75,2.75) B3(-2.25,2.75) B4(-1.75,2.75) B5(-1.25,2.75) B6(-0.75,2.75) B7(-0.25,2.75) B8(0.25,2.75) B9(0.75,2.75) B10(1.25,2.75) B11(1.75,2.75) B12(2.25,2.75) B13(2.75,2.75) B14(3.25,2.75) C1(-3.25,2.25) C2(-2.75,2.25) C3(-2.25,2.25) C4(-1.75,2.25) C5(-1.25,2.25) C6(-0.75,2.25) C7(-0.25,2.25) C8(0.25,2.25) C9(0.75,2.25) C10(1.25,2.25) C11(1.75,2.25) C12(2.25,2.25) C13(2.75,2.25) C14(3.25,2.25) D1(-3.25,1.75) D2(-2.75,1.75) D3(-2.25,1.75) D12(2.25,1.75) D13(2.75,1.75) D14(3.25,1.75) E1(-3.25,1.25) E2(-2.75,1.25) E3(-2.25,1.25) E12(2.25,1.25) E13(2.75,1.25) E14(3.25,1.25) F1(-3.25,0.75) F2(-2.75,0.75) F3(-2.25,0.75) F12(2.25,0.75) F13(2.75,0.75) F14(3.25,0.75) G1(-3.25,0.25) G2(-2.75,0.25) G3(-2.25,0.25) G12(2.25,0.25) G13(2.75,0.25) G14(3.25,0.25) H1(-3.25,-0.25) H2(-2.75,-0.25) H3(-2.25,-0.25) H12(2.25,-0.25) H13(2.75,-0.25) H14(3.25,-0.25) J1(-3.25,-0.75) J2(-2.75,-0.75) J3(-2.25,-0.75) J12(2.25,-0.75) J13(2.75,-0.75) J14(3.25,-0.75) K1(-3.25,-1.25) K2(-2.75,-1.25) K3(-2.25,-1.25) K12(2.25,-1.25) K13(2.75,-1.25) K14(3.25,-1.25) L1(-3.25,-1.75) L2(-2.75,-1.75) L3(-2.25,-1.75) L12(2.25,-1.75) L13(2.75,-1.75) L14(3.25,-1.75) M1(-3.25,-2.25) M2(-2.75,-2.25) M3(-2.25,-2.25) M4(-1.75,-2.25) M5(-1.25,-2.25) M6(-0.75,-2.25) M7(-0.25,-2.25) M8(0.25,-2.25) M9(0.75,-2.25) M10(1.25,-2.25) M11(1.75,-2.25) M12(2.25,-2.25) M13(2.75,-2.25) M14(3.25,-2.25) N1(-3.25,-2.75) N2(-2.75,-2.75) N3(-2.25,-2.75) N4(-1.75,-2.75) N5(-1.25,-2.75) N6(-0.75,-2.75) N7(-0.25,-2.75) N8(0.25,-2.75) N9(0.75,-2.75) N10(1.25,-2.75) N11(1.75,-2.75) N12(2.25,-2.75) N13(2.75,-2.75) N14(3.25,-2.75) P1(-3.25,-3.25) P2(-2.75,-3.25) P3(-2.25,-3.25) P4(-1.75,-3.25) P5(-1.25,-3.25) P6(-0.75,-3.25) P7(-0.25,-3.25) P8(0.25,-3.25) P9(0.75,-3.25) P10(1.25,-3.25) P11(1.75,-3.25) P12(2.25,-3.25) P13(2.75,-3.25) P14(3.25,-3.25)
Top Overlay:
  circle w0.25: c-4.65,3.25 r0.125
  region: -3.242,4 -4,3.242 -4,4
  lines w0.2: -4,3.242 -3.242,4 ; -4,-4 -4,4 4,4 4,-4 -4,-4
Mechanical 13:
  lines w0.1: -4,-4 -4,4 4,4 4,-4 -4,-4
Mechanical 15:
  lines w0.1: -0.5,0 0.5,0 ; 0,-0.5 0,0.5 ; -5,-5 -5,5 5,5 5,-5 -5,-5
3D body: height 1.1, standoff 0, extent -4,-4 4,4

## Crystal SMD [mm]
pads (2):
  rect 4.5x1.5 smd: 1(-3.683,0) 2(4.817,0)
Top Overlay:
  lines w0.2: -5.183,-1.5 -5.183,-2.5 6.317,-2.5 6.317,-1.5 ; -5.183,1.5 -5.183,2.5 6.317,2.5 6.317,1.5 ; -4.433,-2.5 -4.433,-1.5 ; -4.433,1.5 -4.433,2.5
3D body "User Library-HC49_SMD.STEP": height 5.18, standoff 0, extent -5.642,-2.25 6.658,2.25